# Altium schematic symbol library DR127-331-R.SchLib: 1 symbol
Pins are listed as number, name and electrical type; pins without a type are passive.

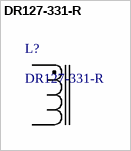
[diagram p0: symbol DR127-331-R]

## DR127-331-R
designator L?
Description; Manufacturer_Name: Eaton; Copyright: Copyright (C) 2026 Ultra Librarian. All rights reserved.; Manufacturer_Part_Number: DR127-331-R
footprint DR127
pins: 1, 2